# Altium schematic symbol library URB2405YMD-15WR3.SchLib: 1 symbol
Pins are listed as number, name and electrical type; pins without a type are passive.

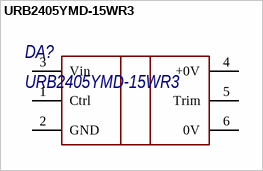
[diagram p0: symbol URB2405YMD-15WR3]

## URB2405YMD-15WR3
designator DA?
DC-DC понижающий преобразователь, Vin: 9-36 В; 5 В; 3 А
pins: 1 Ctrl, 2 GND, 3 Vin, 4 +0V, 5 Trim, 6 0V